# Altium footprint library amirlib.PcbLib: 456 footprints (part 25 of 29)
Each footprint in its own frame and in the unit in brackets; x right, y up, seen from the top. Pads: shape width x height; smd on the part's side, far side on the other; paste and mask are expansions set on the pad; w line width, h text height; cw(c..) or ccw(c..) is an arc to the next point about the centre after c.
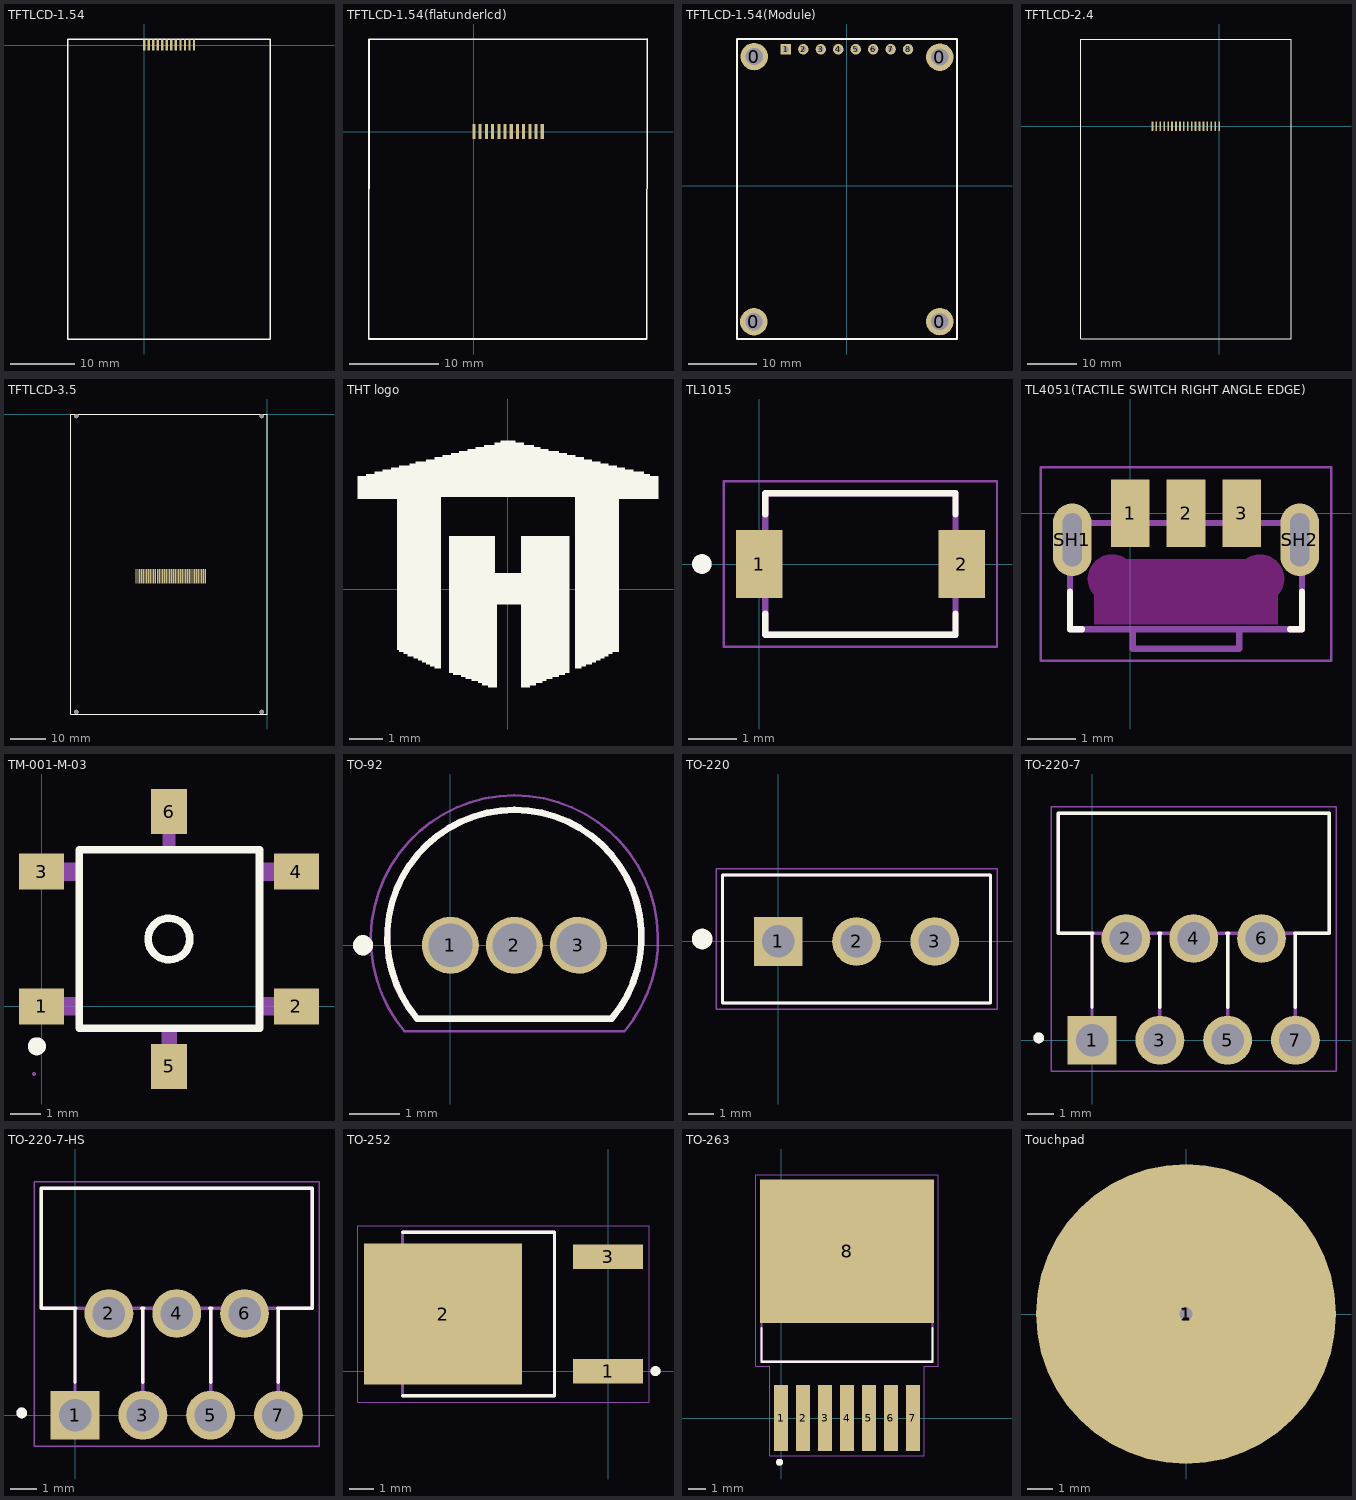
[diagram p24: the footprints below, top view; thin cyan lines are the x and y axes]

## TFTLCD-1.54 [mm]
pads (12):
  rect 0.35x1.7 smd: 1(0,0) 2(0.7,0) 3(1.4,0) 4(2.1,0) 5(2.8,0) 6(3.5,0) 7(4.2,0.017) 8(4.9,0.017) 9(5.6,0.017) 10(6.3,0.017) 11(7,0.017) 12(7.7,0)
Top Overlay:
  lines w0.2: -11.866,-45.491 -11.832,0.903 19.542,0.929 19.472,-45.491 -11.866,-45.491
3D body "1.54 TFT IPS - 12P - Flat Mount.stp": height 1.37, standoff 0, extent -11.862,-45.364 19.533,0.838

## TFTLCD-1.54(flatunderlcd) [mm]
pads (12):
  rect 0.35x1.7 smd: 1(0,0) 2(0.7,0) 3(1.4,0) 4(2.1,0) 5(2.8,0) 6(3.5,0) 7(4.2,0.017) 8(4.9,0.017) 9(5.6,0.017) 10(6.3,0.017) 11(7,0.017) 12(7.7,0)
Top Overlay:
  lines w0.2: -11.862,-23.368 -11.836,10.414 19.533,10.439 19.482,-23.368 -11.862,-23.368
3D body "1.54 TFT IPS - 12P - Flat Flush Mount.stp": height 1.57, standoff 0.03, extent -11.836,-23.368 19.558,10.414

## TFTLCD-1.54(Module) [mil]
pads (12):
  round 157.48 hole 98.43: 0(-533,-781) 0(-531,739) 0(533,-780) 0(533,736)
  rect 60x60 hole 30: 1(-349,781)
  round 60 hole 30: 2(-249,781) 3(-149,781) 4(-49,781) 5(51,781) 6(151,781) 7(251,781) 8(351,781)
Top Overlay:
  lines w10: -629,-879.94 631,-879.94 631,840.06 -629,840.06 -629,-879.94
3D body "1.54 TFT IPS - Module - Assembly.stp": height 106, standoff -47.24, extent -633.5,-880.94 635.5,840.06

## TFTLCD-2.4 [mm]
pads (18):
  rect 0.35x2 smd: 1(0,0) 2(-0.8,0) 3(-1.6,0) 4(-2.4,0) 5(-3.2,0) 6(-4,0) 7(-4.8,0) 8(-5.6,0) 9(-6.4,0) 10(-7.2,0) 11(-8,0) 12(-8.8,0) 13(-9.6,0.017) 14(-10.4,0.017) 15(-11.2,0.017) 16(-12,0.017) 17(-12.8,0.017) 18(-13.6,0.017)
Top Overlay:
  lines w0.254: -28.169,-43.332 14.656,-43.332 14.656,17.78 -28.169,17.78 -28.169,-43.332
3D body "2.4in TFT(Without Glass)- Tucked Cable.stp": height 2.72, standoff -0.03, extent -28.181,-43.165 14.567,17.653

## TFTLCD-3.5 [mm]
pads (44):
  rect 0.35x4 smd: 1(-36.9,-45.72) 2(-36.4,-45.72) 3(-35.9,-45.72) 4(-35.4,-45.72) 5(-34.9,-45.72) 6(-34.4,-45.72) 7(-33.9,-45.72) 8(-33.4,-45.72) 9(-32.9,-45.72) 10(-32.4,-45.72) 11(-31.9,-45.72) 12(-31.4,-45.72) 13(-30.9,-45.72) 14(-30.4,-45.72) 15(-29.9,-45.72) 16(-29.4,-45.72) 17(-28.9,-45.72) 18(-28.4,-45.72) 19(-27.9,-45.72) 20(-27.4,-45.72) 21(-26.9,-45.72) 22(-26.4,-45.72) 23(-25.9,-45.72) 24(-25.4,-45.72) 25(-24.9,-45.72) 26(-24.4,-45.72) 27(-23.9,-45.72) 28(-23.4,-45.72) 29(-22.9,-45.72) 30(-22.4,-45.72) 31(-21.9,-45.72) 32(-21.4,-45.72) 33(-20.9,-45.72) 34(-20.4,-45.72) 35(-19.9,-45.72) 36(-19.4,-45.72) 37(-18.9,-45.72) 38(-18.4,-45.72) 39(-17.9,-45.72) 40(-17.4,-45.72)
  round 1.2 hole 1.2: ""(-53.73,-83.92) ""(-53.73,-0.6) ""(-1.53,-83.92) ""(-1.53,-0.6)
Top Overlay:
  lines w0.254: -55.26,-84.52 -55.26,0 0,0 0,-84.52 -55.26,-84.52

## THT logo [mm]
Top Overlay:
  drawing of 2 lines, arcs and shapes, not listed

## TL1015 [mm]
pads (2):
  rect 0.95x1.4 smd: 1(0,0) 2(4.15,0)
Top Overlay:
  circle w0.2: c-1.175,0 r0.1
  lines w0.127: 0.125,-1.014 0.125,-1.45 4.025,-1.45 4.025,-1.014 ; 0.125,1.014 0.125,1.45 4.025,1.45 4.025,1.014
Mechanical 13:
  circle w0.2: c-1.175,0 r0.1
  lines w0.127: 0.125,-1.45 0.125,1.45 4.025,1.45 4.025,-1.45 0.125,-1.45
Mechanical 15:
  lines w0.05: -0.725,-1.7 -0.725,1.7 4.875,1.7 4.875,-1.7 -0.725,-1.7
3D body "TL1015AF160QG--3DModel-STEP-1.STEP": height 2.55, standoff 0.55, extent -0.175,-1.397 4.325,1.503

## TL4051(TACTILE SWITCH RIGHT ANGLE EDGE) [mm]
pads (5):
  rect 0.8x1.4 smd: 1(0,0) 2(1.15,0) 3(2.3,0)
  oval 0.8x1.5 hole 0.4 slot 1.1 at 90 deg: SH1(-1.2,-0.55) SH2(3.5,-0.55)
Top Overlay:
  lines w0.127: -1.25,-1.62 -1.25,-2.4 -1,-2.4 ; 3.3,-2.4 3.55,-2.4 3.55,-1.62
Keep-Out Layer:
  board cut-out: 3.05,-1.69 3.05,-2.3 -0.75,-2.3 -0.75,-1.69 -0.779,-1.654 -0.806,-1.613 -0.829,-1.57 -0.848,-1.524 -0.862,-1.478 -0.872,-1.429 -0.877,-1.381 -0.877,-1.332 -0.872,-1.283 -0.862,-1.235 -0.848,-1.188 -0.829,-1.142 -0.806,-1.099 -0.779,-1.058 -0.748,-1.02 -0.714,-0.985 -0.676,-0.954 -0.635,-0.927 -0.592,-0.903 -0.547,-0.884 -0.5,-0.87 -0.452,-0.86 -0.403,-0.855 -0.354,-0.855 -0.305,-0.859 -0.257,-0.868 -0.21,-0.882 -0.165,-0.9 -0.121,-0.923 -0.08,-0.95 2.38,-0.95 2.421,-0.923 2.465,-0.9 2.51,-0.882 2.557,-0.868 2.605,-0.859 2.654,-0.855 2.703,-0.855 2.752,-0.86 2.8,-0.87 2.847,-0.884 2.892,-0.903 2.935,-0.927 2.976,-0.954 3.014,-0.985 3.048,-1.02 3.079,-1.058 3.106,-1.099 3.129,-1.142 3.148,-1.188 3.162,-1.235 3.172,-1.283 3.177,-1.332 3.177,-1.381 3.172,-1.429 3.162,-1.478 3.148,-1.524 3.129,-1.57 3.106,-1.613 3.079,-1.654
Mechanical 13:
  lines w0.127: 0.05,-2.4 2.25,-2.4 ; 0.05,-2.4 -1.25,-2.4 -1.25,-0.2 3.55,-0.2 3.55,-2.4 2.25,-2.4 ; 0.05,-2.4 0.05,-2.8 2.25,-2.8 2.25,-2.4
Mechanical 15:
  lines w0.05: -1.85,-3.05 -1.85,0.95 4.15,0.95 4.15,-3.05 -1.85,-3.05
3D body "step_temp.STEP": height 0.92, standoff -2, extent -1.25,-2.8 3.55,-0.2

## TM-001-M-03 [mm]
pads (6):
  rect 1.5x1.2 smd: 1(0,0) 2(8.5,0) 3(0,4.5) 4(8.5,4.5)
  rect 1.2x1.5 smd: 5(4.25,-2) 6(4.25,6.5)
Top Overlay:
  circle w0.254: c4.25,2.25 r0.694
  circle w0.3: c-0.154,-1.327 r0.15
  lines w0.254: 1.262,-0.729 1.262,5.222 7.267,5.222 7.267,-0.729 1.262,-0.729
Bottom Assembly:
  circle w0.3: c-0.444,-0.116 r0.15
  region: 4.168,6.043 4.168,6.958 4.183,6.958 4.333,6.958 4.333,6.046 4.31,6.046
  region: 3.793,6.583 4.708,6.583 4.708,6.568 4.708,6.418 3.796,6.418 3.796,6.441
  region: 3.793,-1.966 4.708,-1.966 4.708,-1.981 4.708,-2.131 3.796,-2.131 3.796,-2.108
Bottom 3D Body:
  region: 4.05,6.05 4.05,6.75 4.45,6.75 4.45,6.05
  region: 4.05,5.24 4.05,6.06 4.45,6.06 4.45,5.24
  region: 4,-2.25 4,-1.55 4.5,-1.55 4.5,-2.25
  region: 4,-1.56 4,-0.74 4.5,-0.74 4.5,-1.56
  region: -0.25,-0.3 -0.25,0.3 0.45,0.3 0.45,-0.3
  region: 0.44,-0.3 0.44,0.3 1.26,0.3 1.26,-0.3
  region: -0.25,4.2 -0.25,4.8 0.45,4.8 0.45,4.2
  region: 0.44,4.2 0.44,4.8 1.26,4.8 1.26,4.2
  region: 8.05,-0.3 8.05,0.3 8.75,0.3 8.75,-0.3
  region: 7.24,-0.3 7.24,0.3 8.06,0.3 8.06,-0.3
  region: 8.05,4.2 8.05,4.8 8.75,4.8 8.75,4.2
  region: 7.24,4.2 7.24,4.8 8.06,4.8 8.06,4.2
  region: -0.19,-2.25 -0.19,-2.275 -0.225,-2.31 -0.275,-2.31 -0.31,-2.275 -0.31,-2.25 -0.31,-2.225 -0.275,-2.19 -0.225,-2.19 -0.19,-2.225
  lines w0.051: 1.25,-0.75 7.25,-0.75 7.25,5.25 1.25,5.25 1.25,-0.75
3D body "TM-001-M-01.stp": height 7.33, standoff 0.03, extent -0.195,-2.207 8.805,6.793

## TO-92 [mm]
pads (3):
  round 1.13 hole 0.87: 1(0,0) 2(1.27,0) 3(2.54,0)
Top Overlay:
  circle w0.2: c-1.73,0 r0.1
  lines w0.127: -0.66,-1.455 cw(c1.27,0.165) 3.2,-1.455 -0.66,-1.455
Mechanical 13:
  circle w0.2: c-1.73,0 r0.1
  lines w0.127: -0.66,-1.455 cw(c1.27,0.165) 3.2,-1.455 -0.66,-1.455
Mechanical 15:
  lines w0.05: -0.91,-1.705 cw(c1.27,0.124) 3.45,-1.705 -0.91,-1.705
3D body "step_temp.STEP": height 5.08, standoff -12.7, extent -1.079,-1.2 3.619,2.483

## TO-220 [mm]
pads (3):
  rect 1.89x1.89 / inner round 1.89 / far side rect 1.89x1.89 hole 1.26: 1(0,0)
  round 1.89 hole 1.26: 2(3.04,0) 3(6.08,0)
Top Overlay:
  circle w0.4: c-2.96,0.095 r0.2
  lines w0.127: -2.17,-2.395 8.25,-2.395 8.25,2.585 -2.17,2.585 -2.17,-2.395
Mechanical 13:
  circle w0.4: c0,0 r0.2
  lines w0.127: -2.17,-2.395 8.25,-2.395 8.25,2.585 -2.17,2.585 -2.17,-2.395
Mechanical 15:
  lines w0.05: -2.42,-2.645 -2.42,2.835 8.5,2.835 8.5,-2.645 -2.42,-2.645
3D body "step_temp.STEP": height 19.22, standoff -9.68, extent -2.06,-1.392 8.14,3.108

## TO-220-7 [mm]
pads (7):
  rect 1.83x1.83 / inner round 1.83 / far side rect 1.83x1.83 hole 1.22: 1(0,0)
  round 1.83 hole 1.22: 2(1.27,3.81) 3(2.54,0) 4(3.81,3.81) 5(5.08,0) 6(6.35,3.81) 7(7.62,0)
Top Overlay:
  circle w0.2: c-2,0.085 r0.1
  lines w0.127: 0,1.235 0,4.002 ; 0.035,4.003 0,4.002 ; 2.505,4.003 2.54,4.003 ; 2.54,1.235 2.54,4.003 ; 2.575,4.003 2.54,4.003 ; 5.045,4.003 5.08,4.003 ; 5.08,1.235 5.08,4.003 ; 5.115,4.003 5.08,4.003 ; 7.585,4.003 7.62,4.002 ; 7.62,1.235 7.62,4.002 ; 0,4.002 -1.27,4.002 -1.27,8.497 8.89,8.497 8.89,4.002 7.62,4.002
Mechanical 13:
  circle w0.2: c-2,0.085 r0.1
  lines w0.127: 0,0.81 0,4.002 ; 2.54,0.81 2.54,4.002 ; 5.08,0.81 5.08,4.002 ; 7.62,0.81 7.62,4.002 ; 0,4.002 -1.27,4.002 -1.27,8.497 8.89,8.497 8.89,4.002 7.62,4.002 ; 0,4.002 2.54,4.002 ; 2.54,4.002 5.08,4.002 ; 5.08,4.002 7.62,4.002
Mechanical 15:
  lines w0.05: -1.52,-1.165 9.14,-1.165 9.14,8.748 -1.52,8.748 -1.52,-1.165
3D body "step_temp.STEP": height 21.36, standoff -8.13, extent -1.27,-0.241 8.89,8.496

## TO-220-7-HS [mm]
pads (7):
  rect 1.83x1.83 / inner round 1.83 / far side rect 1.83x1.83 hole 1.22: 1(0,0)
  round 1.83 hole 1.22: 2(1.27,3.81) 3(2.54,0) 4(3.81,3.81) 5(5.08,0) 6(6.35,3.81) 7(7.62,0)
Top Overlay:
  circle w0.2: c-2,0.085 r0.1
  lines w0.127: 0,1.235 0,4.002 ; 0.035,4.003 0,4.002 ; 2.505,4.003 2.54,4.003 ; 2.54,1.235 2.54,4.003 ; 2.575,4.003 2.54,4.003 ; 5.045,4.003 5.08,4.003 ; 5.08,1.235 5.08,4.003 ; 5.115,4.003 5.08,4.003 ; 7.585,4.003 7.62,4.002 ; 7.62,1.235 7.62,4.002 ; 0,4.002 -1.27,4.002 -1.27,8.497 8.89,8.497 8.89,4.002 7.62,4.002
Mechanical 13:
  circle w0.2: c-2,0.085 r0.1
  lines w0.127: 0,0.81 0,4.002 ; 2.54,0.81 2.54,4.002 ; 5.08,0.81 5.08,4.002 ; 7.62,0.81 7.62,4.002 ; 0,4.002 -1.27,4.002 -1.27,8.497 8.89,8.497 8.89,4.002 7.62,4.002 ; 0,4.002 2.54,4.002 ; 2.54,4.002 5.08,4.002 ; 5.08,4.002 7.62,4.002
Mechanical 15:
  lines w0.05: -1.52,-1.165 9.14,-1.165 9.14,8.748 -1.52,8.748 -1.52,-1.165
3D body "CircuitWorks-TO-220-7S-HS.STEP": height 33.78, standoff -5.59, extent -9.601,-5.156 17.069,9.957

## TO-252 [mm]
pads (3):
  rect 2.81x0.98 smd: 1(0,0) 3(0,4.58)
  rect 6.33x5.67 smd: 2(-6.62,2.29)
Top Overlay:
  circle w0.2: c1.905,0 r0.1
  lines w0.127: -8.245,-0.992 -2.145,-0.992 -2.145,5.573 -8.245,5.573
Top Paste:
  region: -9.495,4.835 -7.965,4.835 -7.965,3.525 -9.495,3.525
  region: -7.385,4.835 -5.855,4.835 -5.855,3.525 -7.385,3.525
  region: -5.275,4.835 -3.745,4.835 -3.745,3.525 -5.275,3.525
  region: -9.495,1.055 -7.965,1.055 -7.965,-0.255 -9.495,-0.255
  region: -7.385,1.055 -5.855,1.055 -5.855,-0.255 -7.385,-0.255
  region: -5.275,1.055 -3.745,1.055 -3.745,-0.255 -5.275,-0.255
  region: -9.495,2.945 -7.965,2.945 -7.965,1.635 -9.495,1.635
  region: -5.275,2.945 -3.745,2.945 -3.745,1.635 -5.275,1.635
  region: -7.385,2.945 -5.855,2.945 -5.855,1.635 -7.385,1.635
Mechanical 13:
  circle w0.2: c1.905,0 r0.1
  lines w0.127: -8.245,-0.992 -2.145,-0.992 -2.145,5.573 -8.245,5.573 -8.245,-0.992
Mechanical 15:
  lines w0.05: -10.035,-1.242 -10.035,5.822 1.655,5.822 1.655,-1.242 -10.035,-1.242
3D body "CircuitWorks-TO-252.STEP": height 2.3, standoff 0, extent -8.9,-1.005 0.8,5.575

## TO-263 [mm]
pads (8):
  rect 0.8x3.81 smd: 1(0,0) 2(1.27,0) 3(2.54,0) 4(3.81,0) 5(5.08,0) 6(6.35,0) 7(7.62,0)
  rect 10.07x8.29 smd paste-6: 8(3.81,9.66)
Top Overlay:
  circle w0.2: c-0.09,-2.55 r0.1
  lines w0.127: -1.14,5.201 -1.14,3.26 8.76,3.26 8.76,5.201
Top Paste:
  region: 4.485,10.485 4.485,8.835 3.135,8.835 3.135,10.485
  region: 2.465,10.485 2.465,8.835 1.115,8.835 1.115,10.485
  region: 0.445,10.485 0.445,8.835 -0.905,8.835 -0.905,10.485
  region: 6.505,10.485 6.505,8.835 5.155,8.835 5.155,10.485
  region: 8.525,10.485 8.525,8.835 7.175,8.835 7.175,10.485
  region: 0.445,13.245 0.445,11.595 -0.905,11.595 -0.905,13.245
  region: 2.465,13.245 2.465,11.595 1.115,11.595 1.115,13.245
  region: 4.485,13.245 4.485,11.595 3.135,11.595 3.135,13.245
  region: 6.505,13.245 6.505,11.595 5.155,11.595 5.155,13.245
  region: 8.525,13.245 8.525,11.595 7.175,11.595 7.175,13.245
  region: 8.525,7.725 8.525,6.075 7.175,6.075 7.175,7.725
  region: 6.505,7.725 6.505,6.075 5.155,6.075 5.155,7.725
  region: 4.485,7.725 4.485,6.075 3.135,6.075 3.135,7.725
  region: 2.465,7.725 2.465,6.075 1.115,6.075 1.115,7.725
  region: 0.445,7.725 0.445,6.075 -0.905,6.075 -0.905,7.725
Mechanical 13:
  circle w0.2: c-0.09,-2.55 r0.1
  lines w0.127: -1.14,3.26 8.76,3.26 8.76,12.66 -1.14,12.66 -1.14,3.26
Mechanical 15:
  lines w0.05: -1.48,3.01 -0.65,3.01 -0.65,-2.16 8.27,-2.16 8.27,3.01 9.1,3.01 9.1,14.06 -1.48,14.06 -1.48,3.01
3D body "step_temp.STEP": height 4.4, standoff 0, extent -1.14,-1.5 8.76,13.4

## Touchpad [mil]
pads (2):
  round 472.44 smd: 1(0,0)
  round 30 hole 20: 1(0,0)
3D body: height 393.7, standoff 0, extent -236.22,-236.22 236.22,236.22